# EAGLE library part 6103XX21821_61032021821 (library WR-PHD)
WR-PHD 2.54 mm SMT Dual Socket Header (Reel) ARTICLE PROPERTIES Pins ： 4;​ 6;​ 8;​ 10;​ 12;​ 14;​ 16;​ 18;​ 20;​ 22;​ 24;​ 26 KIND PROPERTIES Pitch 2.54 mm Quality Class 3 as per CECC 75 301-802 Rows Dual Gender Socket Header Type Straight Type 2 MATERIAL PROPERTIES Insulator Material PA46 Insulator Flammability Rating UL94 V-0 Contact Material Copper Alloy Contact Plating Gold Contact Type Stamped GENERAL INFORMATION Operating Temperature -40 up to +105 °C ELECTRICAL PROPERTIES Rated Current 3 A IR1 = 3A Withstanding Voltage 600 V (AC) Contact Resistance 20 mΩ RISO 1000 MΩ CERTIFICATION UL Approval E323964 PACKAGING PROPERTIES Packaging Tape and Reel with Cap <https://katalog.we-online.com/media/images/v2/o33206v209%20Family_WR-PHD_610xxx21821.jpg> Details see: https://katalog.we-online.com/en/em/PHD_2_54_SMT_DUAL_SOCKET_HEADER_REEL_6103XX21821 Updated by Ella Wu 2019-06-12 2019 (C) Würth Elektronik
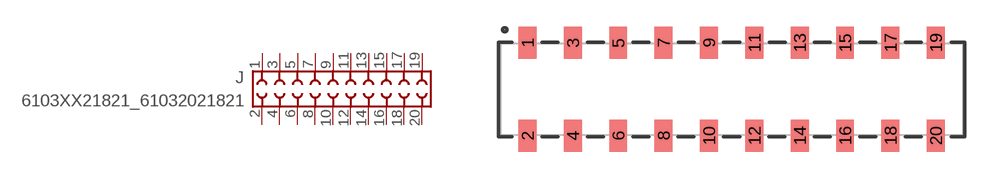
[diagram p263: symbol with the pads of 61032021821; footprint 61032021821]

Designator prefix J

## 6103XX21821_61032021821 (DATASHEET-URL: https://www.we-online.com/redexpert/spec/61032021821?ae; GENDER: Socket Header; IR: 3A; MOUNT: SMT; PACKAGING: Tape and Reel with Cap; PART-NUMBER: 61032021821; PINS: 20; PITCH: 2.54 mm; ROWS: Dual; TYPE: Straight Type 2; VALUE: 61032021821; WE-NUMBER: 61032021821)  [61032021821]
1  1  pas
2  2  pas
3  3  pas
4  4  pas
5  5  pas
6  6  pas
7  7  pas
8  8  pas
9  9  pas
10  10  pas
11  11  pas
12  12  pas
13  13  pas
14  14  pas
15  15  pas
16  16  pas
17  17  pas
18  18  pas
19  19  pas
20  20  pas

## Footprint 61032021821 (pad centres in mm)
WR-PHD 2.54 mm SMT Dual Socket Header (Reel) , 20 Pins
smd 1 x 1.8: 1 -11.43,2.6; 2 -11.43,-2.6; 3 -8.89,2.6; 4 -8.89,-2.6; 5 -6.35,2.6; 6 -6.35,-2.6; 7 -3.81,2.6; 8 -3.81,-2.6; 9 -1.27,2.6; 10 -1.27,-2.6; 11 1.27,2.6; 12 1.27,-2.6; 13 3.81,2.6; 14 3.81,-2.6; 15 6.35,2.6; 16 6.35,-2.6; 17 8.89,2.6; 18 8.89,-2.6; 19 11.43,2.6; 20 11.43,-2.6